# Altium footprint library FTP.PcbLib: 207 footprints (part 12 of 13)
Each footprint in its own frame and in the unit in brackets; x right, y up, seen from the top. Pads: shape width x height; smd on the part's side, far side on the other; paste and mask are expansions set on the pad; w line width, h text height; cw(c..) or ccw(c..) is an arc to the next point about the centre after c.
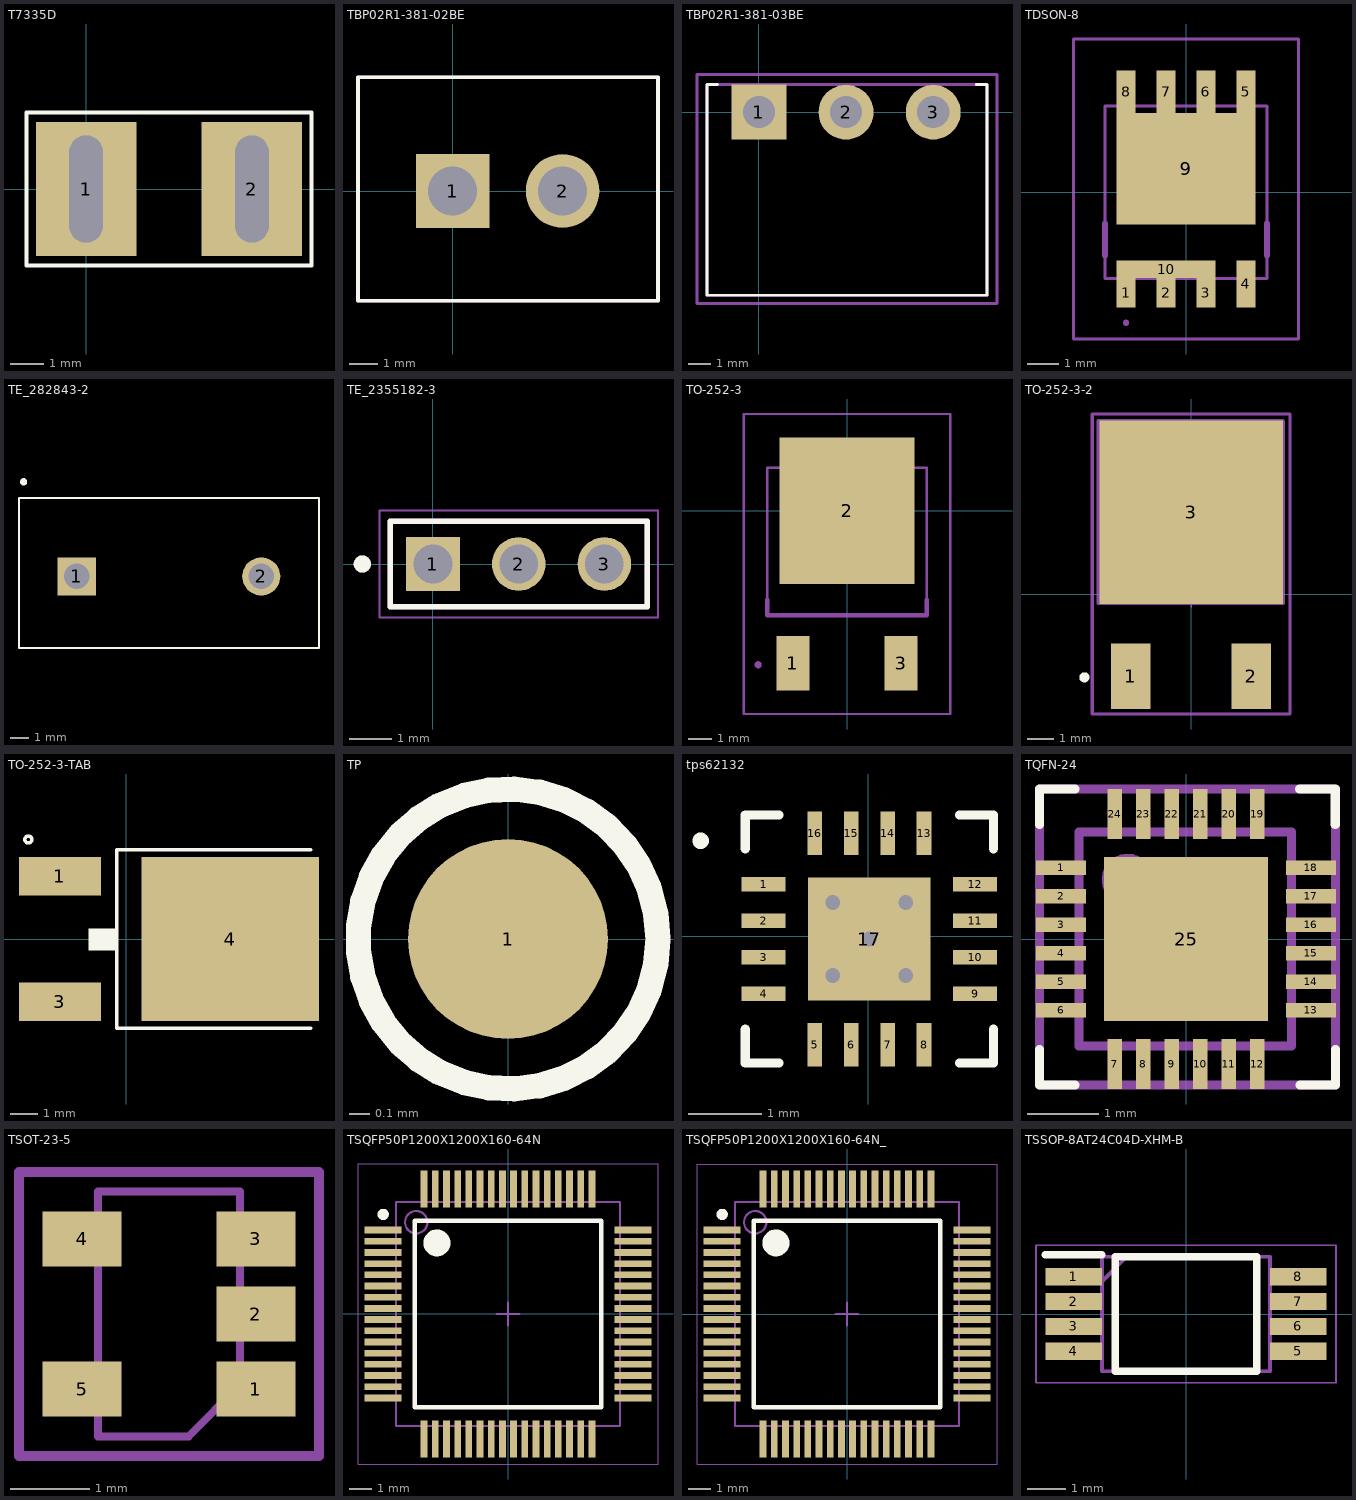
[diagram p11: the footprints below, top view; thin cyan lines are the x and y axes]

## T7335D [mm]
pads (2):
  rect 3x4 hole 1 slot 3.2 at 90 deg: 1(0,0) 2(4.953,0)
Top Overlay:
  lines w0.125: -1.778,-2.286 -1.778,2.286 6.731,2.286 6.731,-2.286 -1.778,-2.286
3D body "T7335D_Assembly.STEP": height 5.35, standoff -27.69, extent -3.25,-8.025 8.75,9.175

## TBP02R1-381-02BE [mm]
pads (2):
  rect 2.55x2.55 hole 1.7: 1(0,0)
  round 2.55 hole 1.7: 2(3.81,0)
Top Overlay:
  lines w0.127: -3.278,-3.798 7.112,-3.798 7.112,3.937 -3.278,3.937 -3.278,-3.798
Mechanical 15:
  lines w0.127: -3.278,-3.798 7.112,-3.798 7.112,3.937 -3.278,3.937 -3.278,-3.798
3D body "Header 3.81mm.STEP": height 7.95, standoff -3.1, extent -2.6,-8.128 6.41,1.072

## TBP02R1-381-03BE [mm]
pads (3):
  rect 2.4x2.4 hole 1.4: 1(0,0)
  round 2.4 hole 1.4: 2(3.81,0) 3(7.62,0)
Top Overlay:
  lines w0.127: -1.8,1.2 -2.258,1.2 -2.258,-8 9.962,-8 9.962,1.2 9.5,1.2
  text "." at -0.5,3.5 h0.76
Mechanical 13:
  lines w0.127: -2.258,-8 -2.258,1.2 9.962,1.2 9.962,-8 -2.258,-8
Mechanical 15:
  lines w0.127: -2.7,-8.357 -2.7,1.643 10.405,1.643 10.405,-8.357 -2.7,-8.357
3D body "CUI_DEVICES_TBP02R1-381-03BE.step": height 7.2, standoff -3.5, extent -2.258,-8 9.962,1.2

## TDSON-8 [mm]
pads (10):
  rect 0.6x0.935 smd: 1(-1.905,-3.199) 2(-0.635,-3.199) 3(0.635,-3.199)
  rect 0.6x1.5 smd: 4(1.905,-2.916)
  rect 0.6x1.35 smd: 5(1.905,3.199) 6(0.635,3.199) 7(-0.635,3.199) 8(-1.905,3.199)
  rect 4.41x3.545 smd: 9(0,0.751)
  rect 3.14x0.565 smd: 10(-0.635,-2.449)
3D Body Bottom:
  lines w0.1: -1.905,-4.2 cw(c-1.905,-4.15) -1.905,-4.1 cw(c-1.905,-4.15) -1.905,-4.2
  lines w0.2: -2.575,-2 -2.575,-1 ; 2.575,-2 2.575,-1
Bottom Assembly:
  lines w0.1: -3.575,-4.666 3.575,-4.666 3.575,4.874 -3.575,4.874 -3.575,-4.666 ; -2.575,-2.74 2.575,-2.74 2.575,2.74 -2.575,2.74 -2.575,-2.74
3D body "IAUC120N06S5N017ATMA1 PACKAGE V1.step": height 1, standoff 0, extent -2.695,-3.051 2.715,3.389

## TE_282843-2 [mm]
pads (2):
  rect 2.1x2.1 hole 1.4: 1(1264.92,1270)
  round 2.1 hole 1.4: 2(1275.08,1270)
Top Overlay:
  circle w0.2: c1261.999,1275.207 r0.1
  lines w0.127: 1261.745,1266.063 1261.745,1274.318 1278.255,1274.318 1278.255,1266.063 1261.745,1266.063
3D body "691213610002_Download_STP_691213610002_rev1.stp": height 10, standoff -3.5, extent 1261.78,1266.091 1278.22,1274.191

## TE_2355182-3 [mm]
pads (3):
  rect 1.25x1.25 hole 0.9: 1(0,0)
  round 1.25 hole 0.9: 2(2,0) 3(4,0)
Top Overlay:
  circle w0.2: c-1.65,0 r0.1
  lines w0.127: -1,-1 5,-1 5,1 -1,1 -1,-1
Mechanical 13:
  circle w0.2: c-1.65,0 r0.1
  lines w0.127: -1,-1 5,-1 ; -1,-1 5,-1 ; -1,-1 -1,1 5,1 5,-1
Mechanical 15:
  lines w0.05: -1.25,-1.25 5.25,-1.25 5.25,1.25 -1.25,1.25 -1.25,-1.25
3D body "2355182-3--3DModel-STEP-1.STEP": height 4, standoff -4.3, extent -1,-1 5,1

## TO-252-3 [mil]
pads (3):
  rect 55x90 smd: 1(-90,-253.35) 3(90,-253.35)
  rect 224.02x243.31 smd: 2(0,0)
3D Body Bottom:
  lines w7.87: -149.61,-255.91 ccw(c-147.64,-255.91) -145.67,-255.91 ; -149.61,-255.91 cw(c-147.64,-255.91) -145.67,-255.91 ; -149.61,-255.91 ccw(c-147.64,-255.91) -145.67,-255.91 ; -132.48,-173.43 -132.48,-147.64 -132.48,-173.43 ; -132.48,-173.43 132.48,-173.43 ; -132.48,-173.43 132.48,-173.43 ; 132.48,-173.43 132.48,-147.64 132.48,-173.43
Bottom Assembly:
  lines w3.94: -171.85,-337.72 171.85,-337.72 171.85,161.02 -171.85,161.02 -171.85,-337.72 ; -132.48,-173.43 132.48,-173.43 132.48,71.46 -132.48,71.46 -132.48,-173.43
3D body "TO-252-3_1.stp": height 92.52, standoff 0, extent -127.36,-282.95 128.54,109.96

## TO-252-3-2 [mm]
pads (3):
  rect 1.5x2.5 smd: 1(-2.3,-3.125) 2(2.3,-3.125)
  rect 7x7 smd: 3(0,3.125)
Top Overlay:
  circle w0.2: c-4.075,-3.175 r0.092
Mechanical 13:
  lines w0.127: -3.55,-0.35 3.525,-0.35 3.525,6.6 3.5,6.625 -3.55,6.625 -3.55,-0.35
Mechanical 15:
  lines w0.05: -0.504,-0.007 0.496,-0.007 ; -0.004,-0.507 -0.004,0.493
  lines w0.127: -3.775,-4.575 3.775,-4.575 3.775,6.875 -3.775,6.875 -3.775,6.325 -3.775,-4.575
3D body "to252-3_p4-56_l6-54_w6-04.stp": height 2.29, standoff -0.01, extent -3.345,-3.545 3.195,6.123

## TO-252-3-TAB [mm]
pads (3):
  rect 3x1.4 smd: 1(-2.44,2.3) 3(-2.44,-2.3)
  rect 6.5x6 smd: 4(3.81,0)
Top Overlay:
  circle w0.127: c-3.6,3.65 r0.127
  region: -1.384,0.381 -0.4,0.381 -0.4,-0.417 -1.384,-0.417
  lines w0.127: 6.763,-3.277 -0.349,-3.277 -0.349,3.277 6.763,3.277
3D body "User Library-TO-252-3.STEP": height 2.41, standoff 0, extent -3.589,-3.368 6.763,3.332

## TP [mm]
pads (1):
  round 1 smd paste-2 mask+0.1: 1(0,0)
Top Overlay:
  circle w0.127: c0,0 r0.75

## tps62132 [mm]
pads (17):
  rrect5% 0.6x0.2 smd: 1(-1.433,0.711) 2(-1.433,0.211) 3(-1.433,-0.289) 4(-1.433,-0.789) 9(1.467,-0.789) 10(1.467,-0.289) 11(1.467,0.211) 12(1.467,0.711)
  rrect5% 0.2x0.6 smd: 5(-0.733,-1.489) 6(-0.233,-1.489) 7(0.267,-1.489) 8(0.767,-1.489) 13(0.767,1.411) 14(0.267,1.411) 15(-0.233,1.411) 16(-0.733,1.411)
  rect 1.68x1.68 smd: 17(0.017,-0.039)
via -0.483,-0.539 diameter 0.4 hole 0.2
via 0.517,-0.539 diameter 0.4 hole 0.2
via 0.017,-0.039 diameter 0.4 hole 0.2
via -0.483,0.461 diameter 0.4 hole 0.2
via 0.517,0.461 diameter 0.4 hole 0.2
Top Overlay:
  circle w0.125: c-2.294,1.307 r0.05
  lines w0.125: -1.683,-1.276 -1.683,-1.739 -1.22,-1.739 ; -1.683,1.199 -1.683,1.661 -1.22,1.661 ; 1.255,-1.739 1.717,-1.739 1.717,-1.276 ; 1.255,1.661 1.717,1.661 1.717,1.199
3D body "TPS62132RGTR.stp": height 1, standoff 0, extent -1.532,-1.589 1.568,1.511

## TQFN-24 [mm]
pads (25):
  rect 0.7x0.2 smd mask+0.07: 1(-1.753,1) 2(-1.753,0.6) 3(-1.753,0.2) 4(-1.753,-0.2) 5(-1.753,-0.6) 6(-1.753,-1) 13(1.753,-1) 14(1.753,-0.6) 15(1.753,-0.2) 16(1.753,0.2) 17(1.753,0.6) 18(1.753,1)
  rect 0.2x0.7 smd mask+0.07: 7(-1,-1.753) 8(-0.6,-1.753) 9(-0.2,-1.753) 10(0.2,-1.753) 11(0.6,-1.753) 12(1,-1.753) 19(1,1.753) 20(0.6,1.753) 21(0.2,1.753) 22(-0.2,1.753) 23(-0.6,1.753) 24(-1,1.753)
  rect 2.3x2.3 smd mask+0.07: 25(0,0)
Top Overlay:
  lines w0.127: -2.057,-1.55 -2.057,-2.048 -1.558,-2.048 ; -2.056,1.606 -2.056,2.104 -1.558,2.104 ; 1.595,2.105 2.093,2.105 2.093,1.607 ; 1.597,-2.045 2.096,-2.045 2.096,-1.547
  text "." at -2.8,1 h0.76
Mechanical 13:
  circle w0.127: c-0.818,0.833 r0.3
  lines w0.127: -1.5,-1.5 1.477,-1.5 1.477,1.5 -1.5,1.5 -1.5,-1.5
Mechanical 15:
  lines w0.127: -2.057,-2.048 2.096,-2.048 2.096,2.105 -2.057,2.105 -2.057,-2.048
  text "+" at -0.497,-0.745 h1.5
3D body "User Library-24 QFN 3x3.step": height 0.98, standoff -0.02, extent -1.5,-1.5 1.5,1.5

## TSOT-23-5 [mm]
pads (5):
  rect 1x0.7 smd paste-0.05 mask+0.07: 1(-7.433,-21.006) 2(-7.433,-20.056) 3(-7.433,-19.106) 4(-9.633,-19.106) 5(-9.633,-21.006)
Mechanical 13:
  lines w0.1: -9.433,-21.606 -9.433,-18.506 -7.633,-18.506 -7.633,-20.956 -8.283,-21.606 -9.433,-21.606
Mechanical 15:
  lines w0.127: -10.433,-21.856 -6.633,-21.856 -6.633,-18.256 -10.433,-18.256 -10.433,-21.856
3D body "SOT-23-5.STEP": height 1.46, standoff 0, extent -10,-21.556 -7,-18.556

## TSQFP50P1200X1200X160-64N [mm]
pads (64):
  rect 1.65x0.3 smd: 1(-5.575,3.75) 2(-5.575,3.25) 3(-5.575,2.75) 4(-5.575,2.25) 5(-5.575,1.75) 6(-5.575,1.25) 7(-5.575,0.75) 8(-5.575,0.25) 9(-5.575,-0.25) 10(-5.575,-0.75) 11(-5.575,-1.25) 12(-5.575,-1.75) 13(-5.575,-2.25) 14(-5.575,-2.75) 15(-5.575,-3.25) 16(-5.575,-3.75) 33(5.575,-3.75) 34(5.575,-3.25) 35(5.575,-2.75) 36(5.575,-2.25) 37(5.575,-1.75) 38(5.575,-1.25) 39(5.575,-0.75) 40(5.575,-0.25) 41(5.575,0.25) 42(5.575,0.75) 43(5.575,1.25) 44(5.575,1.75) 45(5.575,2.25) 46(5.575,2.75) 47(5.575,3.25) 48(5.575,3.75)
  rect 0.3x1.65 smd: 17(-3.75,-5.575) 18(-3.25,-5.575) 19(-2.75,-5.575) 20(-2.25,-5.575) 21(-1.75,-5.575) 22(-1.25,-5.575) 23(-0.75,-5.575) 24(-0.25,-5.575) 25(0.25,-5.575) 26(0.75,-5.575) 27(1.25,-5.575) 28(1.75,-5.575) 29(2.25,-5.575) 30(2.75,-5.575) 31(3.25,-5.575) 32(3.75,-5.575) 49(3.75,5.575) 50(3.25,5.575) 51(2.75,5.575) 52(2.25,5.575) 53(1.75,5.575) 54(1.25,5.575) 55(0.75,5.575) 56(0.25,5.575) 57(-0.25,5.575) 58(-0.75,5.575) 59(-1.25,5.575) 60(-1.75,5.575) 61(-2.25,5.575) 62(-2.75,5.575) 63(-3.25,5.575) 64(-3.75,5.575)
Top Overlay:
  circle w0.25: c-5.575,4.45 r0.125
  circle w0.6: c-3.175,3.175 r0.3
  lines w0.2: -4.175,-4.175 -4.175,4.175 4.175,4.175 4.175,-4.175 -4.175,-4.175
Assembly Top:
  circle w0.1: c-4.1,4.1 r0.5
  lines w0.1: -5,-5 -5,5 5,5 5,-5 -5,-5
Courtyard Top:
  lines w0.05: -6.7,-6.7 -6.7,6.7 6.7,6.7 6.7,-6.7 -6.7,-6.7
  lines w0.1: -0.5,0 0.5,0 ; 0,-0.5 0,0.5
3D body "FT2232HL.stp": height 1.6, standoff 0, extent -6,-6 6,6

## TSQFP50P1200X1200X160-64N_ [mm] "TSQFP, 64-Leads, Body 10.00x20.00mm, Pitch 0.50mm, IPC Medium Density"
height 1.6
pads (64):
  rect 1.65x0.3 smd: 1(-5.575,3.75) 2(-5.575,3.25) 3(-5.575,2.75) 4(-5.575,2.25) 5(-5.575,1.75) 6(-5.575,1.25) 7(-5.575,0.75) 8(-5.575,0.25) 9(-5.575,-0.25) 10(-5.575,-0.75) 11(-5.575,-1.25) 12(-5.575,-1.75) 13(-5.575,-2.25) 14(-5.575,-2.75) 15(-5.575,-3.25) 16(-5.575,-3.75) 33(5.575,-3.75) 34(5.575,-3.25) 35(5.575,-2.75) 36(5.575,-2.25) 37(5.575,-1.75) 38(5.575,-1.25) 39(5.575,-0.75) 40(5.575,-0.25) 41(5.575,0.25) 42(5.575,0.75) 43(5.575,1.25) 44(5.575,1.75) 45(5.575,2.25) 46(5.575,2.75) 47(5.575,3.25) 48(5.575,3.75)
  rect 0.3x1.65 smd: 17(-3.75,-5.575) 18(-3.25,-5.575) 19(-2.75,-5.575) 20(-2.25,-5.575) 21(-1.75,-5.575) 22(-1.25,-5.575) 23(-0.75,-5.575) 24(-0.25,-5.575) 25(0.25,-5.575) 26(0.75,-5.575) 27(1.25,-5.575) 28(1.75,-5.575) 29(2.25,-5.575) 30(2.75,-5.575) 31(3.25,-5.575) 32(3.75,-5.575) 49(3.75,5.575) 50(3.25,5.575) 51(2.75,5.575) 52(2.25,5.575) 53(1.75,5.575) 54(1.25,5.575) 55(0.75,5.575) 56(0.25,5.575) 57(-0.25,5.575) 58(-0.75,5.575) 59(-1.25,5.575) 60(-1.75,5.575) 61(-2.25,5.575) 62(-2.75,5.575) 63(-3.25,5.575) 64(-3.75,5.575)
Top Overlay:
  circle w0.6: c-3.175,3.175 r0.3
  circle w0.25: c-5.575,4.45 r0.125
  lines w0.2: -4.175,-4.175 4.175,-4.175 4.175,4.175 -4.175,4.175 -4.175,-4.175
Assembly Top:
  circle w0.1: c-4.1,4.1 r0.5
  lines w0.1: -5,-5 5,-5 5,5 -5,5 -5,-5
Courtyard Top:
  lines w0.05: -6.7,-6.7 6.7,-6.7 6.7,6.7 -6.7,6.7 -6.7,-6.7
  lines w0.1: -0.5,0 0.5,0 ; 0,-0.5 0,0.5
3D body: height 1.6, standoff 0.05, extent 0,0 0,0
3D body: height 0.25, standoff 0, extent 19.05,1.905 19.05,1.905
3D body "FT2232HL.stp": height 1.6, standoff 0, extent -6,-6 6,6
3D body: height 0.25, standoff 0, extent 8.89,-1.27 8.89,-1.27

## TSSOP-8AT24C04D-XHM-B [mm]
pads (8):
  rect 1.475x0.45 smd: 1(-2.938,0.975) 2(-2.938,0.325) 3(-2.938,-0.325) 4(-2.938,-0.975) 5(2.938,-0.975) 6(2.938,-0.325) 7(2.938,0.325) 8(2.938,0.975)
Top Overlay:
  lines w0.2: -3.675,1.55 -2.2,1.55 ; -1.85,-1.5 1.85,-1.5 1.85,1.5 -1.85,1.5 -1.85,-1.5
Mechanical 15:
  lines w0.1: -2.2,0.85 -1.55,1.5 ; -2.2,-1.5 2.2,-1.5 2.2,1.5 -2.2,1.5 -2.2,-1.5
Mechanical 20:
  lines w0.05: -3.925,-1.8 3.925,-1.8 3.925,1.8 -3.925,1.8 -3.925,-1.8
3D body "AT24C04D-XHM-B.stp": height 1.2, standoff 0, extent -3.4,-1.5 3,1.5